# Altium footprint library XTAL_OSCILATOR_CLK-BUFFER.PcbLib: 3 footprints
Each footprint in its own frame and in the unit in brackets; x right, y up, seen from the top. Pads: shape width x height; smd on the part's side, far side on the other; paste and mask are expansions set on the pad; w line width, h text height; cw(c..) or ccw(c..) is an arc to the next point about the centre after c.
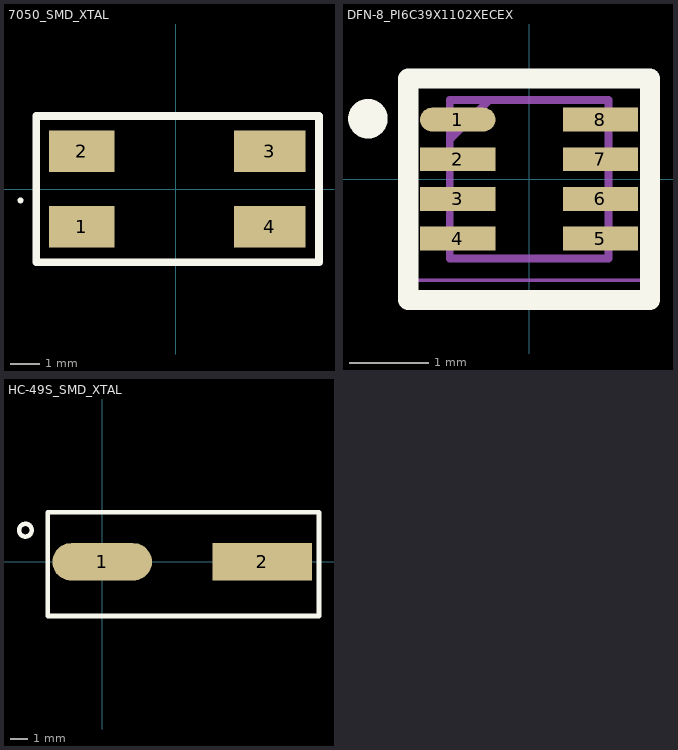
[diagram p0: the footprints below, top view; thin cyan lines are the x and y axes]

## 7050_SMD_XTAL [mm] "ABMM-16.000MHZ-12-R100-N2"
pads (4):
  rect 2.2x1.4 smd: 1(-3.15,-1.27) 2(-3.15,1.27)
  rect 2.4x1.4 smd: 3(3.15,1.27) 4(3.15,-1.27)
Top Overlay:
  circle w0.1: c-5.207,-0.381 r0.05
  lines w0.254: -4.68,-2.459 4.803,-2.459 4.803,2.449 -4.68,2.449 -4.68,-2.459
3D body "ABMM-16.000MHZ-12-R100-N2-X-T--3DModel-STEP-368357.STEP": height 1.3, standoff 0, extent -3.34,-2.603 3.848,2.603

## DFN-8_PI6C39X1102XECEX [mm] "2 outputs, max 100MHz, Vcc: 1.5V,1.8V,2.5V,3.3V"
height 0.5
pads (8):
  oval 0.95x0.3 smd: 1(-0.9,0.75)
  rect 0.95x0.3 smd: 2(-0.9,0.25) 3(-0.9,-0.25) 4(-0.9,-0.75) 5(0.9,-0.75) 6(0.9,-0.25) 7(0.9,0.25) 8(0.9,0.75)
Top Overlay:
  circle w0.25: c-2.032,0.762 r0.125
  lines w0.254: -1.524,-1.524 1.524,-1.524 1.524,1.27 -1.524,1.27 -1.524,-1.524
Mechanical 15:
  lines w0.1: -1,0.5 -0.5,1 ; -1,-1 -1,1 1,1 1,-1 -1,-1
Mechanical 20:
  lines w0.05: -1.625,-1.275 -1.625,1.275 1.625,1.275 1.625,-1.275 -1.625,-1.275
3D body "PI6C39X1102XECEX.stp": height 0.5, standoff 0, extent -1,-1 1,1

## HC-49S_SMD_XTAL [mm]
pads (2):
  oval 5.6x2.1 smd: 1(0,0)
  rect 5.6x2.1 smd: 2(9,0)
Top Overlay:
  circle w0.254: c-4.318,1.778 r0.359
  lines w0.254: -3.048,-3.048 -3.048,2.794 12.192,2.794 12.192,-3.048 -3.048,-3.048
3D body "ABLS-12.288MHZ-K4T.stp": height 4.2, standoff 0, extent -1.778,-2.414 10.922,2.286